# Altium footprint library PcbLib1.PcbLib: 43 footprints (part 2 of 3)
Each footprint in its own frame and in the unit in brackets; x right, y up, seen from the top. Pads: shape width x height; smd on the part's side, far side on the other; paste and mask are expansions set on the pad; w line width, h text height; cw(c..) or ccw(c..) is an arc to the next point about the centre after c.
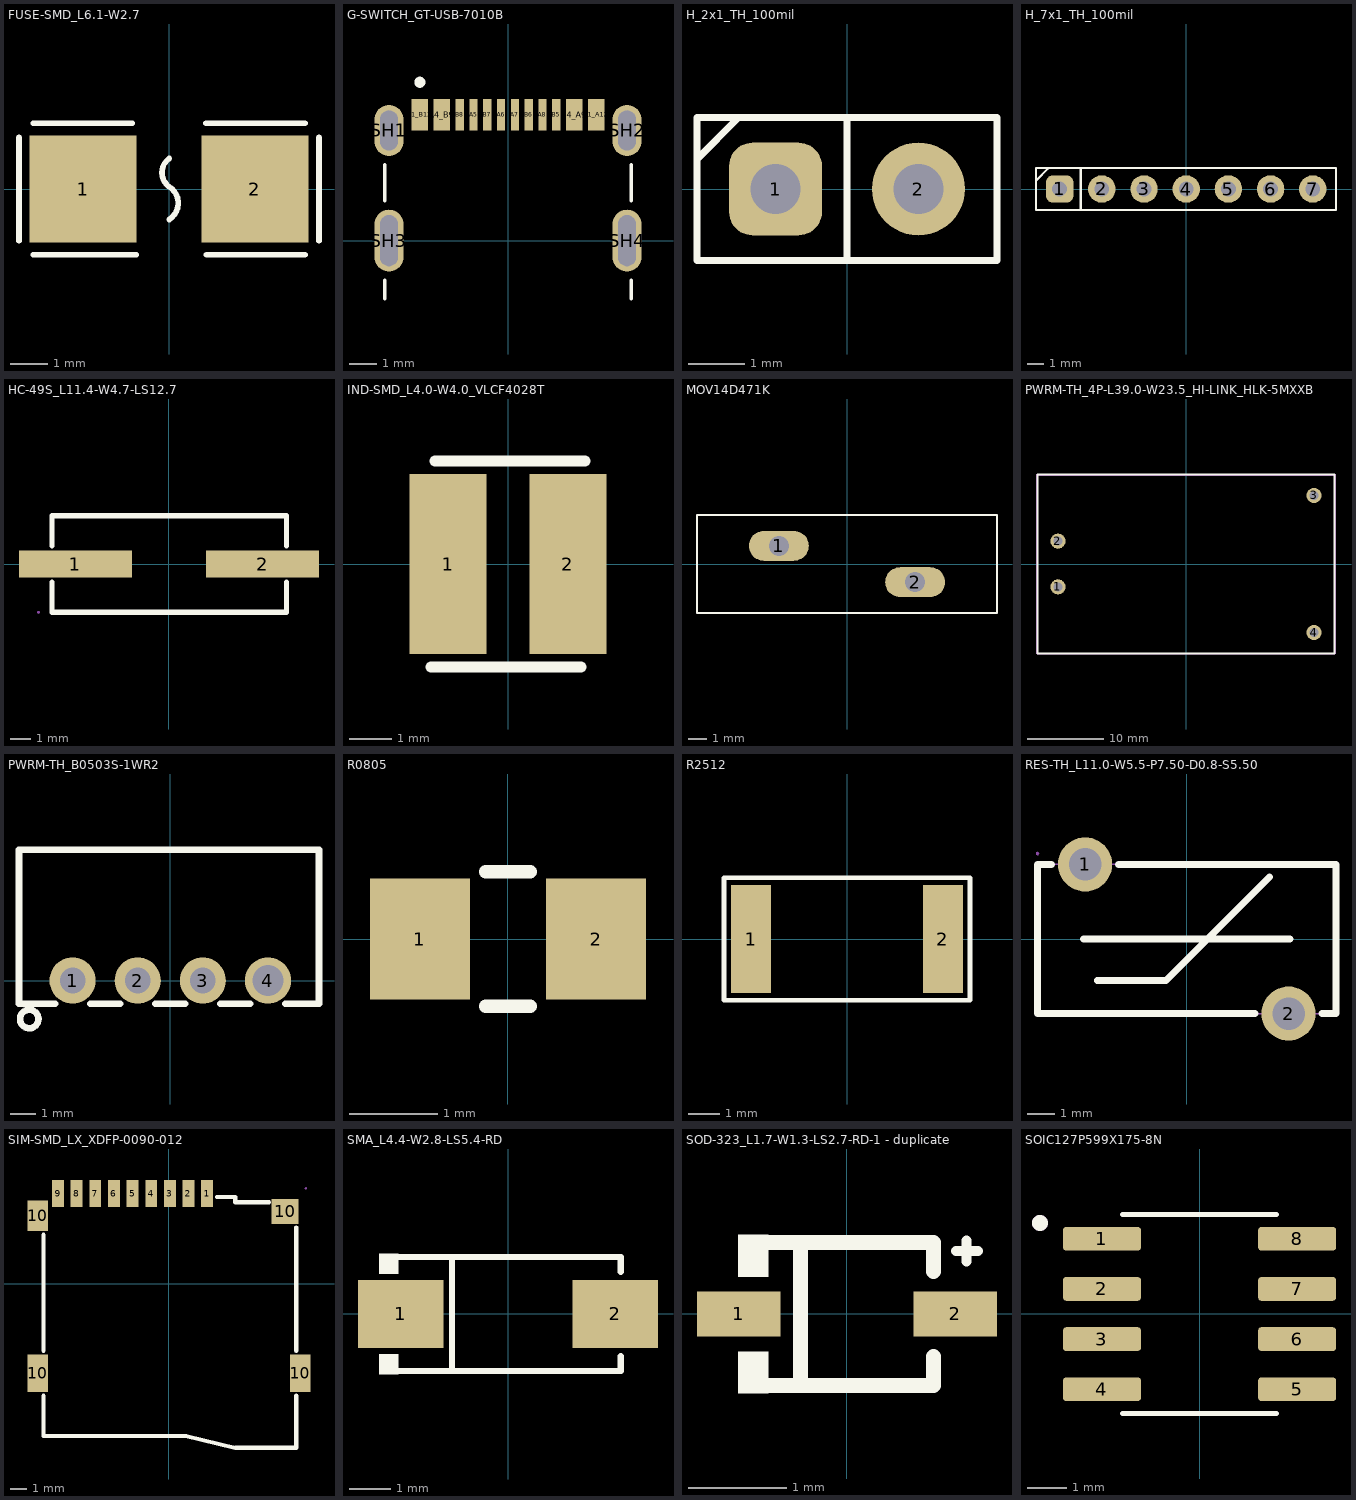
[diagram p1: the footprints below, top view; thin cyan lines are the x and y axes]

## FUSE-SMD_L6.1-W2.7 [mm]
pads (2):
  rect 2.911x2.906 smd paste-100: 1(-2.329,0) 2(2.329,0)
Top Overlay:
  lines w0.152: -4.064,-1.397 -4.064,1.397 ; -3.683,-1.778 -0.889,-1.778 ; -3.683,1.778 -1.001,1.778 ; 0.005,-0.826 0.081,-0.767 0.145,-0.696 0.196,-0.612 0.229,-0.523 0.246,-0.429 0.246,-0.333 0.229,-0.239 0.196,-0.15 0.145,-0.066 0.081,0.005 0.005,0.064 -0.061,0.122 -0.117,0.191 -0.157,0.272 -0.183,0.356 -0.191,0.445 -0.183,0.533 -0.157,0.617 -0.117,0.699 -0.061,0.767 0.005,0.826 ; 1.001,1.778 3.683,1.778 ; 1.016,-1.778 3.683,-1.778 ; 4.064,-1.397 4.064,1.397
Top Paste:
  region: 0.874,-1.354 0.874,-0.594 0.975,-0.493 1.765,-0.493 1.864,-0.394 1.864,0.394 1.765,0.493 0.975,0.493 0.874,0.594 0.874,1.354 0.975,1.453 3.686,1.453 3.785,1.354 3.785,-1.354 3.686,-1.453 0.975,-1.453
  region: -0.874,-1.354 -0.874,-0.594 -0.975,-0.493 -1.765,-0.493 -1.864,-0.394 -1.864,0.394 -1.765,0.493 -0.975,0.493 -0.874,0.594 -0.874,1.354 -0.975,1.453 -3.686,1.453 -3.785,1.354 -3.785,-1.354 -3.686,-1.453 -0.975,-1.453
3D body: height 2.16, standoff -0.59, extent -2.921,-1.27 3.175,1.27

## G-SWITCH_GT-USB-7010B [mm]
height 3.16
pads (16):
  rect 0.6x1.15 smd: A1_B12(-3.2,4.565) A4_B9(-2.4,4.565) B1_A12(3.2,4.565) B4_A9(2.4,4.565)
  rect 0.3x1.15 smd: A5(-1.25,4.565) A6(-0.25,4.565) A7(0.25,4.565) A8(1.25,4.565) B5(1.75,4.565) B6(0.75,4.565) B7(-0.75,4.565) B8(-1.75,4.565)
  oval 1.05x1.85 hole 0.65 slot 1.45 at 90 deg: SH1(-4.32,4) SH2(4.32,4)
  oval 1.05x2.25 hole 0.65 slot 1.85 at 90 deg: SH3(-4.32,0) SH4(4.32,0)
Top Overlay:
  circle w0.2: c-3.2,5.75 r0.1
  lines w0.127: -4.47,-2.1 -4.47,-1.445 ; -4.47,1.445 -4.47,2.755 ; 4.47,-2.1 4.47,-1.445 ; 4.47,1.445 4.47,2.755

## H_2x1_TH_100mil [mil]
pads (2):
  rrect50% 65x65 hole 35: 1(-50,0)
  round 65 hole 35: 2(50,0)
Top Overlay:
  lines w5: -105,20.87 -75.87,50 ; 0,-50 0,50 ; -105,-50 105,-50 105,50 -105,50 -105,-50
3D body "PH1-02-UA.STEP": height 338.58, standoff -116.14, extent -100.8,-49.16 99.48,49.26

## H_7x1_TH_100mil [mil]
pads (7):
  rrect50% 65x65 hole 35: 1(-300,0)
  round 65 hole 35: 2(-200,0) 3(-100,0) 4(0,0) 5(100,0) 6(200,0) 7(300,0)
Top Overlay:
  lines w5: -356,19.68 -326.87,48.82 ; -250,-50 -250,50 ; -356,-50 -356,50 355,50 355,-50 -356,-50
3D body "CircuitWorks-HEADER 2_54 VERTICAL 5X.STEP": height 335.15, standoff -97.93, extent -150,-49.21 350,49.22
3D body "PH1-02-UA.STEP": height 338.58, standoff -116.14, extent -350.8,-49.16 -150.52,49.26

## HC-49S_L11.4-W4.7-LS12.7 [mil]
pads (2):
  rect 216.5x51.2 smd: 1(-179.2,0) 2(179.3,0)
Top Overlay:
  lines w10: -224.4,-34.7 -224.4,-92.5 225,-92.5 225,-34.7 ; -224.4,34.7 -224.4,92.5 225,92.5 225,34.7
Mechanical 8:
  region: -247.6,-92.5 -248,-93.8 -249,-94.7 -250.3,-94.9 -251.5,-94.3 -252.2,-93.2 -252.2,-91.9 -251.5,-90.8 -250.3,-90.2 -249,-90.4 -248,-91.3

## IND-SMD_L4.0-W4.0_VLCF4028T [mm]
pads (2):
  rect 1.801x4.201 smd: 1(-1.4,0) 2(1.4,0)
Top Overlay:
  lines w0.254: -1.798,-2.4 1.702,-2.4 ; -1.699,2.4 1.801,2.4
Mechanical 8:
  region: -2.014,-2.002 -2.024,-2.032 -2.05,-2.055 -2.083,-2.06 -2.113,-2.045 -2.131,-2.017 -2.131,-1.984 -2.113,-1.956 -2.083,-1.941 -2.05,-1.946 -2.024,-1.968
3D body: height 3, standoff -0.59, extent -2.032,-1.905 2.032,1.905

## MOV14D471K [mm]
pads (2):
  oval 3.3x1.65 hole 1.1: 1(-3.75,1) 2(3.75,-1)
Top Overlay:
  lines w0.1: -8.25,-2.7 8.25,-2.7 8.25,2.7 -8.25,2.7 -8.25,-2.7
3D body "step_temp.STEP": height 20, standoff -20, extent -8.25,-2.2 8.25,2.2

## PWRM-TH_4P-L39.0-W23.5_HI-LINK_HLK-5MXXB [mm]
pads (4):
  round 1.999 hole 1.199 paste-2539.97 mask+0.051: 1(-16.8,-3) 2(-16.8,3) 3(16.8,8.999) 4(16.8,-8.999)
Top Overlay:
  lines w0.254: -19.5,-11.75 19.5,-11.75 19.5,11.75 -19.5,11.75 -19.5,-11.75
Mechanical 2:
  region: -19.685,-11.684 -19.685,11.684 -19.675,11.732 -19.647,11.773 -19.606,11.801 -19.558,11.811 19.558,11.811 19.606,11.801 19.647,11.773 19.675,11.732 19.685,11.684 19.685,-11.684 19.675,-11.732 19.647,-11.773 19.606,-11.801 19.558,-11.811 19.51,-11.801 19.469,-11.773 19.441,-11.732 19.431,-11.684 19.431,11.557 -19.431,11.557 -19.431,-11.684 -19.441,-11.732 -19.469,-11.773 -19.51,-11.801 -19.558,-11.811 -19.606,-11.801 -19.647,-11.773 -19.675,-11.732
Mechanical 6:
  lines w0.051: -19.5,-11.75 -19.5,11.75 19.5,11.75 19.5,-11.75 -19.5,-11.75
Mechanical 8:
  region: -19.441,-11.75 -19.449,-11.783 -19.474,-11.803 -19.51,-11.808 -19.54,-11.796 -19.558,-11.768 -19.558,-11.732 -19.54,-11.704 -19.51,-11.692 -19.474,-11.694 -19.449,-11.717
Mechanical 9:
  region: -16.299,-3 -16.309,-3.099 -16.337,-3.19 -16.383,-3.277 -16.447,-3.353 -16.523,-3.416 -16.609,-3.462 -16.703,-3.49 -16.8,-3.5 -16.899,-3.49 -16.99,-3.462 -17.079,-3.416 -17.153,-3.353 -17.216,-3.277 -17.262,-3.19 -17.29,-3.099 -17.3,-3 -17.29,-2.903 -17.262,-2.809 -17.216,-2.723 -17.153,-2.647 -17.079,-2.583 -16.99,-2.537 -16.899,-2.51 -16.8,-2.499 -16.703,-2.51 -16.609,-2.537 -16.523,-2.583 -16.447,-2.647 -16.383,-2.723 -16.337,-2.809 -16.309,-2.903
  region: -16.299,3 -16.309,2.903 -16.337,2.809 -16.383,2.723 -16.447,2.647 -16.523,2.583 -16.609,2.537 -16.703,2.51 -16.8,2.499 -16.899,2.51 -16.99,2.537 -17.079,2.583 -17.153,2.647 -17.216,2.723 -17.262,2.809 -17.29,2.903 -17.3,3 -17.29,3.099 -17.262,3.19 -17.216,3.277 -17.153,3.353 -17.079,3.416 -16.99,3.462 -16.899,3.49 -16.8,3.5 -16.703,3.49 -16.609,3.462 -16.523,3.416 -16.447,3.353 -16.383,3.277 -16.337,3.19 -16.309,3.099
  region: 17.3,8.999 17.29,8.903 17.262,8.809 17.216,8.722 17.153,8.646 17.079,8.585 16.99,8.537 16.899,8.509 16.8,8.499 16.703,8.509 16.609,8.537 16.523,8.585 16.447,8.646 16.383,8.722 16.337,8.809 16.309,8.903 16.299,8.999 16.309,9.098 16.337,9.192 16.383,9.279 16.447,9.352 16.523,9.416 16.609,9.461 16.703,9.489 16.8,9.5 16.899,9.489 16.99,9.461 17.079,9.416 17.153,9.352 17.216,9.279 17.262,9.192 17.29,9.098
  region: 17.3,-8.999 17.29,-9.098 17.262,-9.192 17.216,-9.279 17.153,-9.352 17.079,-9.416 16.99,-9.461 16.899,-9.489 16.8,-9.5 16.703,-9.489 16.609,-9.461 16.523,-9.416 16.447,-9.352 16.383,-9.279 16.337,-9.192 16.309,-9.098 16.299,-8.999 16.309,-8.903 16.337,-8.809 16.383,-8.722 16.447,-8.646 16.523,-8.585 16.609,-8.537 16.703,-8.509 16.8,-8.499 16.899,-8.509 16.99,-8.537 17.079,-8.585 17.153,-8.646 17.216,-8.722 17.262,-8.809 17.29,-8.903

## PWRM-TH_B0503S-1WR2 [mm]
pads (4):
  round 1.8 hole 1: 1(-3.81,0) 2(-1.27,0) 3(1.27,0)
  round 1.8 hole 1.2: 4(3.81,0)
Top Overlay:
  circle w0.254: c-5.5,-1.5 r0.361
  lines w0.254: -5.9,5.1 -5.9,-0.9 -4.494,-0.9 ; -5.8,5.1 5.8,5.1 5.8,-0.9 4.494,-0.9 ; -3.126,-0.9 -1.954,-0.9 ; -0.586,-0.9 0.586,-0.9 ; 1.954,-0.9 3.126,-0.9
Mechanical 8:
  region: -5.74,-0.892 -5.74,-0.917 -5.775,-0.952 -5.825,-0.952 -5.86,-0.917 -5.86,-0.892 -5.86,-0.867 -5.825,-0.832 -5.775,-0.832 -5.74,-0.867 -5.74,-0.892
3D body: height 10, standoff 0, extent -5.969,-1.016 5.715,5.08

## R0805 [mm]
pads (2):
  rect 1.133x1.377 smd paste-100 mask+0.051: 1(-0.998,0) 2(1.001,0)
Top Overlay:
  lines w0.152: -0.254,-0.762 0.254,-0.762 ; -0.254,0.762 0.254,0.762
Top Paste:
  region: -1.699,-0.64 -1.699,0.64 -1.648,0.691 -0.498,0.691 -0.45,0.64 -0.445,0.231 -0.894,0.231 -0.894,-0.221 -0.455,-0.221 -0.45,-0.64 -0.498,-0.691 -1.648,-0.691
  region: 0.452,-0.64 0.452,-0.221 0.897,-0.221 0.897,0.231 0.457,0.231 0.452,0.64 0.5,0.691 1.651,0.691 1.702,0.64 1.702,-0.64 1.651,-0.691 0.5,-0.691

## R2512 [mil]
pads (2):
  rect 50.5x136.1 smd paste-3937: 1(-120.8,0) 2(120.7,0)
Top Overlay:
  lines w6: -155,-77 98.4,-77 154.9,-77 154.9,77.1 98.4,77.1 -155,77.1 -155,-77
Top Paste:
  region: 95.4,-64.1 95.4,-27 99.4,-23.1 108.7,-23.1 112.6,-19.2 112.6,19.2 108.7,23.2 99.4,23.2 95.4,27.1 95.4,64.1 99.4,68.1 142,68.1 145.9,64.1 145.9,-64.1 142,-68 99.4,-68
  region: -95.5,-64.1 -95.5,-27 -99.4,-23.1 -108.7,-23.1 -112.7,-19.2 -112.7,19.2 -108.7,23.2 -99.4,23.2 -95.5,27.1 -95.5,64.1 -99.4,68.1 -142.1,68.1 -146,64.1 -146,-64.1 -142.1,-68 -99.4,-68
Mechanical 8:
  region: -122.7,-63 -123,-64.2 -124.1,-65.1 -125.4,-65.3 -126.6,-64.7 -127.3,-63.6 -127.3,-62.3 -126.6,-61.2 -125.4,-60.6 -124.1,-60.8 -123,-61.7
3D body "R2512_labeled.step": height 23.66, standoff 0, extent -133.86,-62.05 133.86,60

## RES-TH_L11.0-W5.5-P7.50-D0.8-S5.50 [mm]
pads (2):
  round 1.999 hole 1.199: 1(-3.749,2.751) 2(3.749,-2.748)
Top Overlay:
  lines w0.254: -4.981,2.751 -5.499,2.751 -5.499,-2.748 2.517,-2.748 ; -3.81,0 3.81,0 ; -3.302,-1.524 -0.762,-1.524 3.048,2.286 ; -2.517,2.751 5.499,2.751 5.499,-2.748 4.981,-2.748
Mechanical 6:
  lines w0.051: -5.499,-2.748 5.499,-2.748 5.499,2.751 -5.499,2.751 -5.499,-2.748
Mechanical 8:
  region: -5.441,3.152 -5.451,3.119 -5.476,3.096 -5.509,3.091 -5.54,3.106 -5.558,3.134 -5.558,3.167 -5.54,3.195 -5.509,3.211 -5.476,3.205 -5.451,3.183
Mechanical 9:
  region: 4.148,-2.748 4.14,-2.837 4.11,-2.924 4.061,-2.997 3.998,-3.061 3.922,-3.109 3.838,-3.139 3.749,-3.15 3.66,-3.139 3.576,-3.109 3.5,-3.061 3.437,-2.997 3.388,-2.924 3.358,-2.837 3.348,-2.748 3.358,-2.659 3.388,-2.576 3.437,-2.499 3.5,-2.436 3.576,-2.388 3.66,-2.36 3.749,-2.349 3.838,-2.36 3.922,-2.388 3.998,-2.436 4.061,-2.499 4.11,-2.576 4.14,-2.659
  region: -3.35,2.751 -3.358,2.662 -3.388,2.578 -3.437,2.502 -3.5,2.438 -3.576,2.39 -3.66,2.362 -3.749,2.352 -3.838,2.362 -3.922,2.39 -3.998,2.438 -4.061,2.502 -4.11,2.578 -4.14,2.662 -4.15,2.751 -4.14,2.84 -4.11,2.924 -4.061,3 -3.998,3.063 -3.922,3.111 -3.838,3.142 -3.749,3.152 -3.66,3.142 -3.576,3.111 -3.5,3.063 -3.437,3 -3.388,2.924 -3.358,2.84

## SIM-SMD_LX_XDFP-0090-012 [mil]
pads (13):
  rect 27.6x63 smd: 1(88.6,208.7) 2(45.3,208.7) 3(2,208.7) 4(-41.3,208.7) 5(-84.6,208.7) 6(-127.9,208.7) 7(-171.2,208.7) 8(-214.5,208.7) 9(-257.8,208.7)
  rect 47.2x86.6 smd: 10(-305.1,-208.7) 10(305.2,-208.7)
  rect 47.2x70.9 smd: 10(-305.1,157.5)
  rect 63x59.1 smd: 10(269.7,167.3)
Top Overlay:
  lines w10: -291.3,-261.1 -291.3,-354.3 39.4,-354.3 153.6,-381.9 295.3,-381.9 295.3,-261.1 ; -291.3,-156.3 -291.3,112.9 ; 111.5,200.8 153.6,200.8 153.6,189 232.3,189 ; 295.3,-156.3 295.3,129.9
Mechanical 8:
  region: 320.4,221 320.1,219.7 319.1,218.8 317.7,218.6 316.5,219.2 315.8,220.3 315.8,221.6 316.5,222.8 317.7,223.3 319.1,223.1 320.1,222.3

## SMA_L4.4-W2.8-LS5.4-RD [mm]
pads (2):
  rect 2.046x1.62 smd: 1(-2.565,0) 2(2.565,0)
Top Overlay:
  region: -2.625,1.44 -2.625,0.962 -3.082,0.962 -3.082,1.44
  region: -2.625,-1.44 -2.625,-0.962 -3.082,-0.962 -3.082,-1.44
  lines w0.152: -2.701,-1.364 2.701,-1.364 2.701,-1.013 ; -2.701,1.364 2.701,1.364 2.701,1.013 ; -1.339,-1.364 -1.339,1.364
Mechanical 8:
  region: -2.74,-1.375 -2.74,-1.4 -2.775,-1.435 -2.825,-1.435 -2.86,-1.4 -2.86,-1.375 -2.86,-1.35 -2.825,-1.315 -2.775,-1.315 -2.74,-1.35 -2.74,-1.375
3D body "SMA_DIO.step": height 2.35, standoff 0, extent -3.014,-1.435 2.576,1.485

## SOD-323_L1.7-W1.3-LS2.7-RD-1 - duplicate [mm]
pads (2):
  rect 0.846x0.455 smd: 1(-1.097,0) 2(1.1,0)
Top Overlay:
  region: -0.798,-0.803 -0.798,-0.381 -1.102,-0.381 -1.102,-0.803
  region: -0.798,0.803 -0.798,0.378 -1.102,0.378 -1.102,0.803
  lines w0.102: 1.106,0.637 1.221,0.637 ; 1.203,0.638 1.331,0.638 ; 1.214,0.531 1.214,0.744
  lines w0.152: -0.876,-0.726 0.876,-0.726 0.876,-0.432 ; -0.876,0.726 0.876,0.726 0.876,0.429 ; -0.47,-0.726 -0.47,0.726

## SOIC127P599X175-8N [mm]
pads (8):
  rrect25% 1.97x0.6 smd paste+0: 1(-2.47,1.905) 2(-2.47,0.635) 3(-2.47,-0.635) 4(-2.47,-1.905) 5(2.47,-1.905) 6(2.47,-0.635) 7(2.47,0.635) 8(2.47,1.905)
Top Overlay:
  circle w0.2: c-4.04,2.305 r0.1
  lines w0.127: -1.95,-2.525 1.95,-2.525 ; -1.95,2.525 1.95,2.525
Mechanical 13:
  circle w0.2: c-4.04,2.305 r0.1
3D body "step_temp.STEP": height 1.75, standoff 0, extent -2.995,-2.452 2.995,2.452